# Altium footprint library Footprints.PcbLib: 320 footprints (part 13 of 20)
Each footprint in its own frame and in the unit in brackets; x right, y up, seen from the top. Pads: shape width x height; smd on the part's side, far side on the other; paste and mask are expansions set on the pad; w line width, h text height; cw(c..) or ccw(c..) is an arc to the next point about the centre after c.
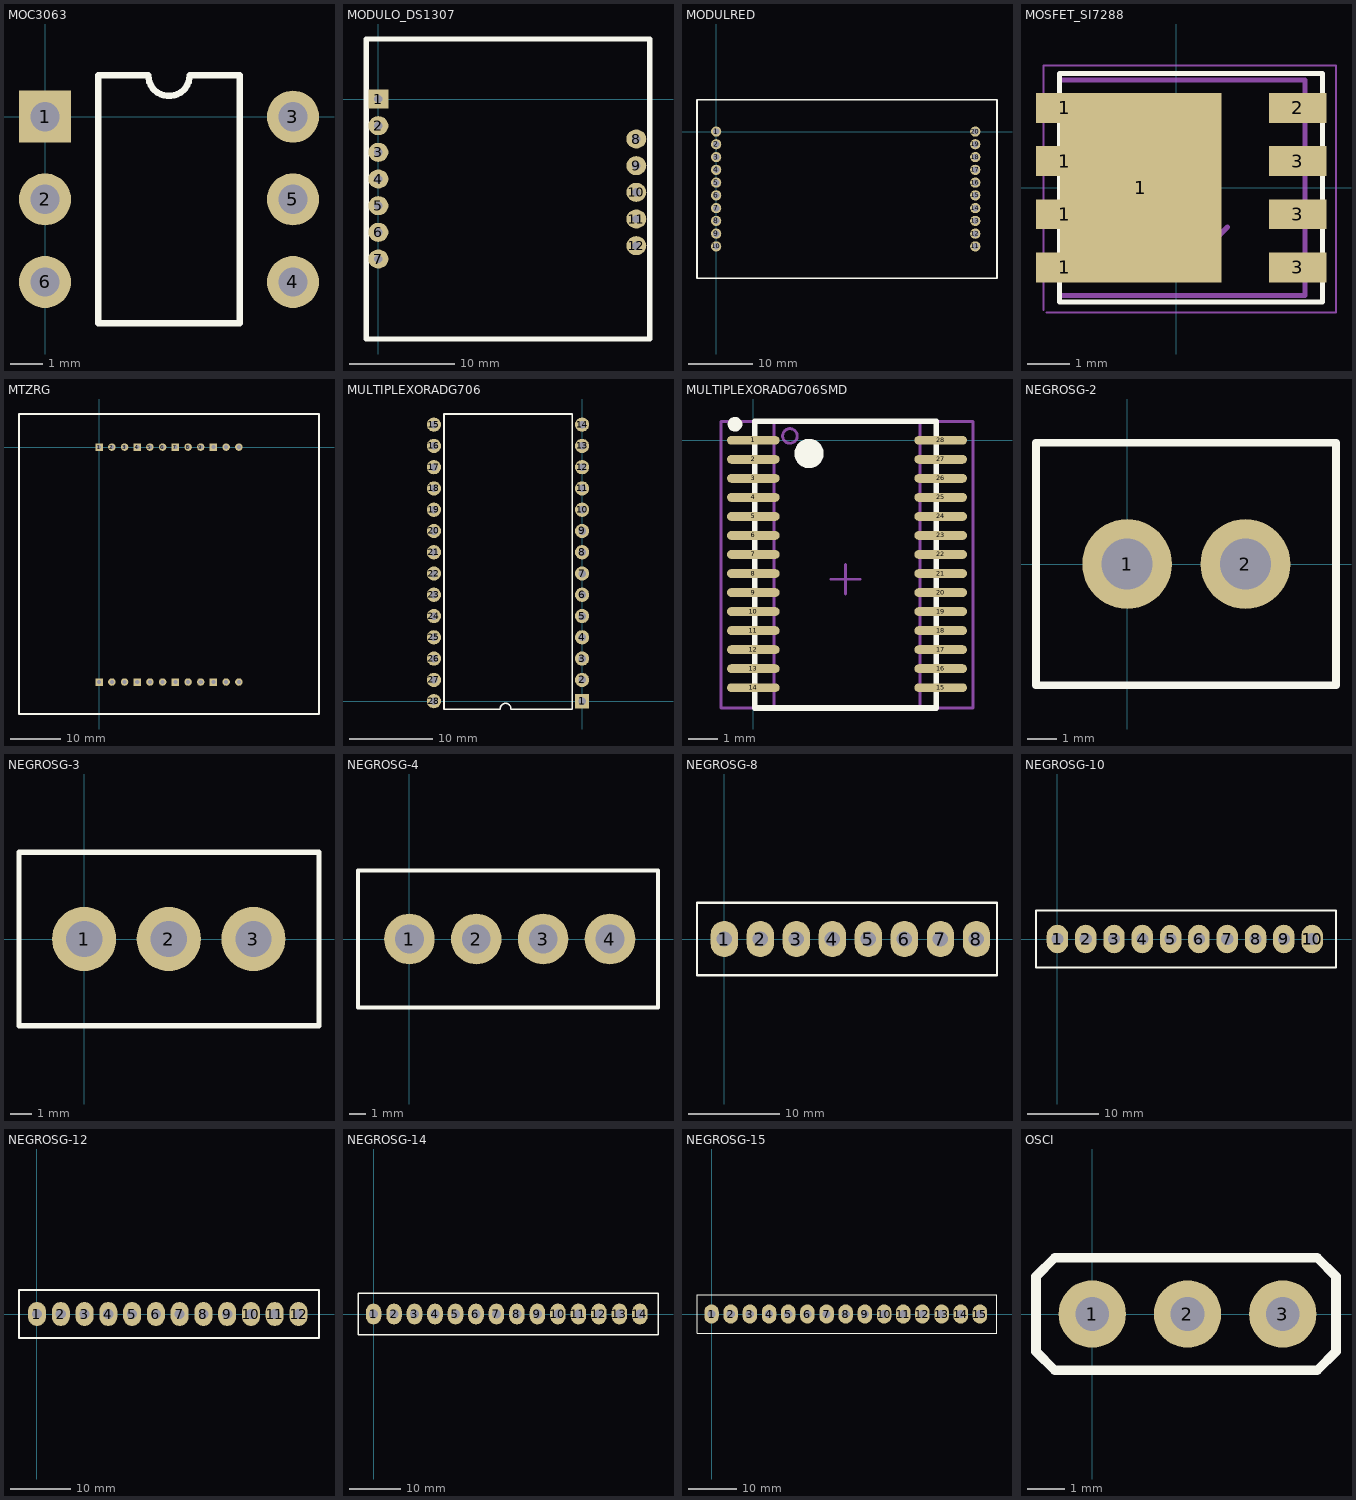
[diagram p12: the footprints below, top view; thin cyan lines are the x and y axes]

## MOC3063 [mm]
pads (6):
  rect 1.6x1.6 hole 0.9: 1(0,0)
  round 1.6 hole 0.9: 2(0,-2.54) 3(7.62,0) 4(7.62,-5.08) 5(7.62,-2.54) 6(0,-5.08)
Top Overlay:
  lines w0.2: 1.635,-6.35 5.985,-6.35 5.985,1.27 4.445,1.27 cw(c3.81,1.27) 3.175,1.27 1.635,1.27 1.635,-6.35

## MODULO_DS1307 [mm]
pads (12):
  rect 1.9x1.8 hole 0.8: 1(0,0)
  oval 1.9x1.8 hole 0.8: 2(0,-2.54) 3(0,-5.08) 4(0,-7.62) 5(0,-10.16) 6(0,-12.7) 7(0,-15.24) 8(24.57,-3.81) 9(24.57,-6.35) 10(24.57,-8.89) 11(24.57,-11.43) 12(24.57,-13.97)
Top Overlay:
  lines w0.5: -1.148,-22.86 25.84,-22.86 25.84,5.715 -1.148,5.715 -1.148,-22.86
3D body: height 0, standoff 0, extent -1.147,-22.86 25.839,5.715

## MODULRED [mm]
pads (20):
  round 1.6 hole 1: 1(0,0) 2(0,-2) 3(0,-4) 4(0,-6) 5(0,-8) 6(0,-10) 7(0,-12) 8(0,-14) 9(0,-16) 10(0,-18) 11(40.6,-18) 12(40.6,-16) 13(40.6,-14) 14(40.6,-12) 15(40.6,-10) 16(40.6,-8) 17(40.6,-6) 18(40.6,-4) 19(40.6,-2) 20(40.6,0)
Top Overlay:
  lines w0.254: -3,-23.01 -3,5 44,5 44,-23 -3,-23

## MOSFET_SI7288 [mm]
pads (9):
  rect 1.372x0.71 smd: 1(-2.667,-1.905) 1(-2.667,-0.635) 1(-2.667,0.635) 1(-2.667,1.905) 2(2.9,1.905) 3(2.9,-1.905) 3(2.9,-0.635) 3(2.9,0.635)
  rect 3.85x4.52 smd: 1(-0.85,0)
Top Overlay:
  lines w0.12: -2.794,-2.73 -2.794,2.73 3.492,2.73 3.492,-2.73 -2.794,-2.73
Mechanical 13:
  lines w0.12: 0.508,-1.651 1.218,-0.941 ; -2.794,-2.575 3.075,-2.575 3.075,2.575 -2.794,2.575 -2.794,-2.575
Mechanical 15:
  circle w0.05: c0,0 r0.25
  lines w0.05: -3.175,-2.921 -3.175,2.921 3.81,2.921 3.81,-2.984 -3.1,-2.984 ; -0.35,0 0.35,0 ; 0,-0.35 0,0.35
3D body: height 1, standoff 0, extent -2.794,-2.574 3.074,2.574

## MTZRG [mm] "Pad para Matriz Bicolor 8x8 con anodo comun"
height 9
pads (24):
  rect 1.5x1.5 hole 0.8: 1(0,0) 4(7.62,0) 7(15.24,0) 10(22.86,0) 15(22.86,-46.99) 18(15.24,-46.99) 21(7.62,-46.99) 24(0,-46.99)
  round 1.5 hole 0.8: 2(2.54,0) 3(5.08,0) 5(10.16,0) 6(12.7,0) 8(17.78,0) 9(20.32,0) 11(25.4,0) 12(27.94,0) 13(27.94,-46.99) 14(25.4,-46.99) 16(20.32,-46.99) 17(17.78,-46.99) 19(12.7,-46.99) 20(10.16,-46.99) 22(5.08,-46.99) 23(2.54,-46.99)
Top Overlay:
  lines w0.5: -16.03,-53.39 43.97,-53.39 43.97,6.61 -16.03,6.61 -16.03,-53.39

## MULTIPLEXORADG706 [mm]
pads (28):
  rect 1.7x1.7 hole 0.9: 1(0,0)
  round 1.7 hole 0.9: 2(0,2.54) 3(0,5.08) 4(0,7.62) 5(0,10.16) 6(0,12.7) 7(0,15.24) 8(0,17.78) 9(0,20.32) 10(0,22.86) 11(0,25.4) 12(0,27.94) 13(0,30.48) 14(0,33.02) 15(-17.7,33.02) 16(-17.7,30.48) 17(-17.7,27.94) 18(-17.7,25.4) 19(-17.7,22.86) 20(-17.7,20.32) 21(-17.7,17.78) 22(-17.7,15.24) 23(-17.7,12.7) 24(-17.7,10.16) 25(-17.7,7.62) 26(-17.7,5.08) 27(-17.7,2.54) 28(-17.7,0)
Top Overlay:
  lines w0.2: -9.77,-0.96 -16.5,-0.96 -16.5,34.29 -1.16,34.29 -1.16,-0.96 -8.5,-0.96 ; -9.77,-0.9 cw(c-9.135,-0.9) -8.5,-0.9
  lines w0.254: -17.7,2.5 -17.66,2.54 ; -17.7,20.28 -17.66,20.32

## MULTIPLEXORADG706SMD [mm]
pads (28):
  oval 1.8x0.3 smd: 1(0,0) 2(0,-0.65) 3(0,-1.3) 4(0,-1.95) 5(0,-2.6) 6(0,-3.25) 7(0,-3.9) 8(0,-4.55) 9(0,-5.2) 10(0,-5.85) 11(0,-6.5) 12(0,-7.15) 13(0,-7.8) 14(0,-8.45) 15(6.4,-8.45) 16(6.4,-7.8) 17(6.4,-7.15) 18(6.4,-6.5) 19(6.4,-5.85) 20(6.4,-5.2) 21(6.4,-4.55) 22(6.4,-3.9) 23(6.4,-3.25) 24(6.4,-2.6) 25(6.4,-1.95) 26(6.4,-1.3) 27(6.4,-0.65) 28(6.4,0)
Top Overlay:
  circle w0.25: c-0.625,0.55 r0.125
  circle w0.6: c1.9,-0.45 r0.2
  lines w0.2: 0.05,-9.15 0.05,0.65 6.25,0.65 6.25,-9.15 0.05,-9.15
Mechanical 13:
  circle w0.1: c1.25,0.15 r0.25
  lines w0.1: 0.7,-9.15 0.7,0.65 5.7,0.65 5.7,-9.15 0.7,-9.15
Mechanical 15:
  lines w0.1: 2.65,-4.745 3.65,-4.745 ; 3.15,-5.245 3.15,-4.245 ; -1.1,-9.15 -1.1,0.65 7.5,0.65 7.5,-9.15 -1.1,-9.15
3D body: height 2.65, standoff 0, extent 0.7,-9.15 5.7,0.65

## NEGROSG-2 [mm]
pads (2):
  round 3 hole 1.7: 1(0,0) 2(3.962,0)
Top Overlay:
  lines w0.254: -3.048,-4.064 -3.048,0 -3.048,4.064 6.992,4.064 6.992,-4.064 -3.048,-4.064

## NEGROSG-3 [mm]
pads (3):
  round 3 hole 1.7: 1(0,0) 2(3.962,0) 3(7.924,0)
Top Overlay:
  lines w0.254: -3.048,-4.064 10.992,-4.064 10.992,4.064 -3.048,4.064 -3.048,0 -3.048,-4.064

## NEGROSG-4 [mm]
pads (4):
  round 3 hole 1.7: 1(0,0) 2(3.962,0) 3(7.924,0) 4(11.886,0)
Top Overlay:
  lines w0.254: -3.048,-4.064 14.732,-4.064 14.732,4.064 -3.048,4.064 -3.048,0 -3.048,-4.064

## NEGROSG-8 [mm]
pads (8):
  oval 3x4 hole 1.7: 1(0,0) 2(3.962,0) 3(7.925,0) 4(11.887,0) 5(15.85,0) 6(19.812,0) 7(23.774,0) 8(27.737,0)
Top Overlay:
  lines w0.254: -3,-0.01 -3,4 30,4 30,-4 -3,-4 -3,0

## NEGROSG-10 [mm]
pads (10):
  oval 3x4 hole 1.7: 1(0,0) 2(3.962,0) 3(7.925,0) 4(11.887,0) 5(15.85,0) 6(19.812,0) 7(23.774,0) 8(27.737,0) 9(31.699,0) 10(35.662,0)
Top Overlay:
  lines w0.254: -3,-4 -3,4 39,4 39,-4 -3,-4

## NEGROSG-12 [mm]
pads (12):
  oval 3x4 hole 1.7: 1(0,0) 2(3.962,0) 3(7.925,0) 4(11.887,0) 5(15.85,0) 6(19.812,0) 7(23.774,0) 8(27.737,0) 9(31.699,0) 10(35.662,0) 11(39.624,0) 12(43.586,0)
Top Overlay:
  lines w0.254: -3,-4 -3,4 47,4 47,-4 -3,-4

## NEGROSG-14 [mm]
pads (14):
  oval 3x4 hole 1.7: 1(0,0) 2(3.962,0) 3(7.925,0) 4(11.887,0) 5(15.85,0) 6(19.812,0) 7(23.774,0) 8(27.737,0) 9(31.699,0) 10(35.662,0) 11(39.624,0) 12(43.586,0) 13(47.549,0) 14(51.511,0)
Top Overlay:
  lines w0.254: -3,-4 -3,4 55,4 55,-4 -3,-4

## NEGROSG-15 [mm]
pads (15):
  oval 3x4 hole 1.7: 1(0,0) 2(3.962,0) 3(7.925,0) 4(11.887,0) 5(15.85,0) 6(19.812,0) 7(23.774,0) 8(27.737,0) 9(31.699,0) 10(35.662,0) 11(39.624,0) 12(43.586,0) 13(47.549,0) 14(51.511,0) 15(55.474,0)
Top Overlay:
  lines w0.254: -3,-4 -3,4 59,4 59,-4 -3,-4

## OSCI [mm]
pads (3):
  round 1.8 hole 0.9: 1(0,0) 2(2.54,0) 3(5.08,0)
Top Overlay:
  lines w0.254: -1.5,-1 -1.5,0 -1.5,1 -1,1.5 6,1.5 6.5,1 6.5,-1 6,-1.5 -1,-1.5 -1.5,-1